# Altium footprint library MY_LIB_Connectors.PcbLib: 358 footprints (part 17 of 23)
Each footprint in its own frame and in the unit in brackets; x right, y up, seen from the top. Pads: shape width x height; smd on the part's side, far side on the other; paste and mask are expansions set on the pad; w line width, h text height; cw(c..) or ccw(c..) is an arc to the next point about the centre after c.
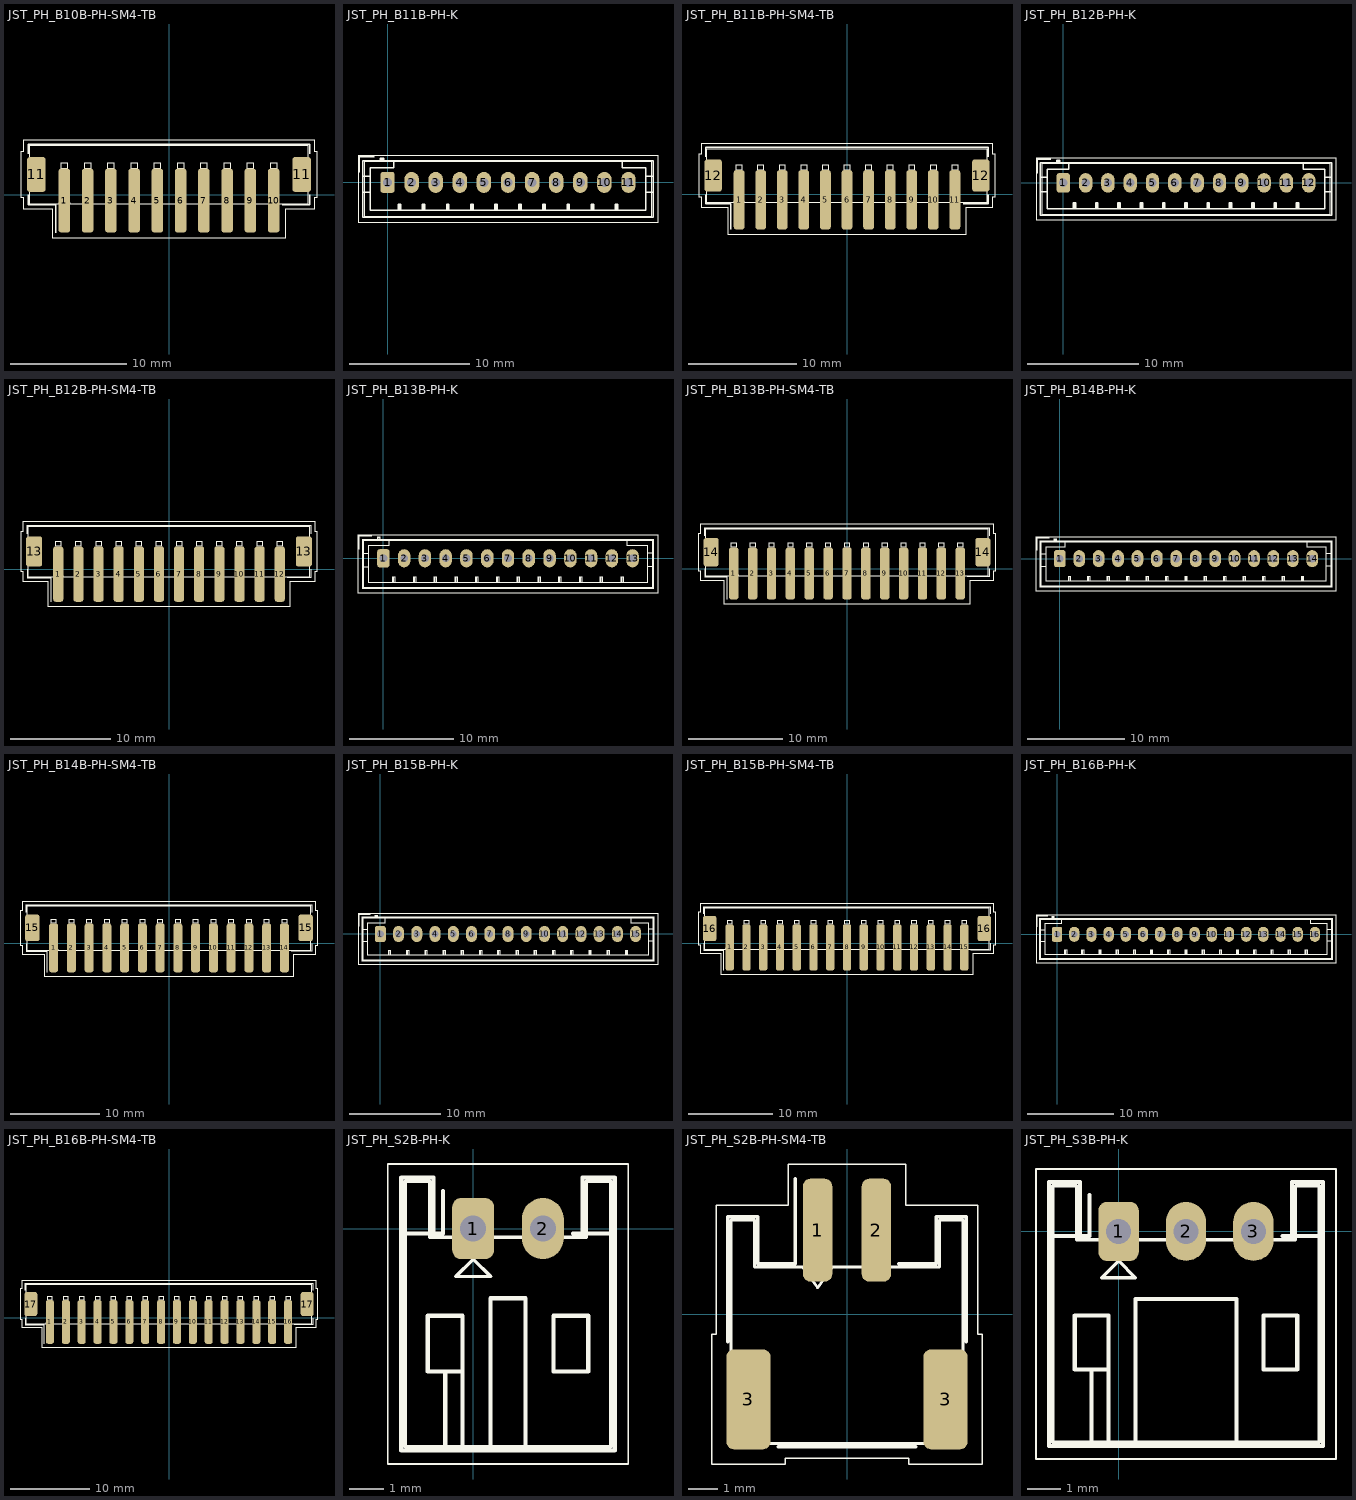
[diagram p16: the footprints below, top view; thin cyan lines are the x and y axes]

## JST_PH_B10B-PH-SM4-TB [mm] "JST B10B-PH-SM4-TB; reviewed KiCad footprint; ready STEP reference model"
height 6.725
pads (12):
  rrect50% 1x5.5 all layers, no hole: 1(-9,-0.5) 2(-7,-0.5) 3(-5,-0.5) 4(-3,-0.5) 5(-1,-0.5) 6(1,-0.5) 7(3,-0.5) 8(5,-0.5) 9(7,-0.5) 10(9,-0.5)
  rrect31% 1.6x3 all layers, no hole: 11(-11.4,1.75) 11(11.4,1.75)
Top Overlay:
  lines w0.05: -12.7,-0.25 -12.7,3.75 -12.48,3.75 -12.48,4.75 12.48,4.75 12.48,3.75 12.7,3.75 12.7,-0.25 12.48,-0.25 12.48,-1.25 10,-1.25 10,-3.75 -10,-3.75 -10,-1.25 -12.48,-1.25 -12.48,-0.25 -12.7,-0.25
  lines w0.1: -9.5,-0.75 -9,-0.043 -8.5,-0.75 ; -11.975,-0.75 -11.975,4.25 11.975,4.25 11.975,-0.75 -11.975,-0.75 ; -9.25,2.25 -8.75,2.25 -8.75,2.75 -9.25,2.75 -9.25,2.25 ; -7.25,2.25 -6.75,2.25 -6.75,2.75 -7.25,2.75 -7.25,2.25 ; -5.25,2.25 -4.75,2.25 -4.75,2.75 -5.25,2.75 -5.25,2.25 ; -3.25,2.25 -2.75,2.25 -2.75,2.75 -3.25,2.75 -3.25,2.25 ; -1.25,2.25 -0.75,2.25 -0.75,2.75 -1.25,2.75 -1.25,2.25 ; 0.75,2.25 1.25,2.25 1.25,2.75 0.75,2.75 0.75,2.25 ; 2.75,2.25 3.25,2.25 3.25,2.75 2.75,2.75 2.75,2.25 ; 4.75,2.25 5.25,2.25 5.25,2.75 4.75,2.75 4.75,2.25 ; 6.75,2.25 7.25,2.25 7.25,2.75 6.75,2.75 6.75,2.25 ; 8.75,2.25 9.25,2.25 9.25,2.75 8.75,2.75 8.75,2.25
  lines w0.12: -12.085,-0.01 -12.085,-0.86 -9.76,-0.86 -9.76,-3.25 ; -12.085,3.51 -12.085,4.36 12.085,4.36 12.085,3.51 ; 9.76,-0.86 12.085,-0.86 12.085,-0.01
3D body "JST-B10B-PH-SM4-TB.STEP": height 6.73, standoff 0, extent -11.975,-0.75 11.975,4.25

## JST_PH_B11B-PH-K [mm] "JST B11B-PH-K; reviewed KiCad footprint; ready STEP reference model"
height 6
pads (11):
  rrect42% 1.2x1.75 hole 0.75: 1(0,0)
  oval 1.2x1.75 hole 0.75: 2(2,0) 3(4,0) 4(6,0) 5(8,0) 6(10,0) 7(12,0) 8(14,0) 9(16,0) 10(18,0) 11(20,0)
Top Overlay:
  lines w0.05: -2.45,-3.3 -2.45,2.2 22.45,2.2 22.45,-3.3 -2.45,-3.3
  lines w0.1: -2.36,0.86 -2.36,2.11 -1.11,2.11 ; -1.95,-2.8 -1.95,1.7 21.95,1.7 21.95,-2.8 -1.95,-2.8
  lines w0.12: -2.36,0.86 -2.36,2.11 -1.11,2.11 ; -2.06,-0.8 -1.45,-0.8 ; -2.06,0.5 -1.45,0.5 ; -0.6,1.81 -0.6,2.01 -0.3,2.01 -0.3,1.81 ; -0.6,1.91 -0.3,1.91 ; 0.5,1.81 0.5,1.2 -1.45,1.2 -1.45,-2.3 21.45,-2.3 21.45,1.2 19.5,1.2 19.5,1.81 ; 0.9,-2.3 0.9,-1.8 1.1,-1.8 1.1,-2.3 ; 1,-2.3 1,-1.8 ; 2.9,-2.3 2.9,-1.8 3.1,-1.8 3.1,-2.3 ; 3,-2.3 3,-1.8 ; 4.9,-2.3 4.9,-1.8 5.1,-1.8 5.1,-2.3 ; 5,-2.3 5,-1.8 ; 6.9,-2.3 6.9,-1.8 7.1,-1.8 7.1,-2.3 ; 7,-2.3 7,-1.8 ; 8.9,-2.3 8.9,-1.8 9.1,-1.8 9.1,-2.3 ; 9,-2.3 9,-1.8 ; 10.9,-2.3 10.9,-1.8 11.1,-1.8 11.1,-2.3 ; 11,-2.3 11,-1.8 ; 12.9,-2.3 12.9,-1.8 13.1,-1.8 13.1,-2.3 ; 13,-2.3 13,-1.8 ; 14.9,-2.3 14.9,-1.8 15.1,-1.8 15.1,-2.3 ; 15,-2.3 15,-1.8 ; 16.9,-2.3 16.9,-1.8 17.1,-1.8 17.1,-2.3 ; 17,-2.3 17,-1.8 ; 18.9,-2.3 18.9,-1.8 19.1,-1.8 19.1,-2.3 ; 19,-2.3 19,-1.8 ; 21.45,-0.8 22.06,-0.8 ; 21.45,0.5 22.06,0.5 ; -2.06,-2.91 -2.06,1.81 22.06,1.81 22.06,-2.91 -2.06,-2.91
3D body "JST_PH_B11B-PH-K_1x11_P2.00mm_Vertical.step": height 6, standoff -3.4, extent -2.36,-2.8 21.95,2.11

## JST_PH_B11B-PH-SM4-TB [mm] "JST B11B-PH-SM4-TB; reviewed KiCad footprint; ready STEP reference model"
height 6.725
pads (13):
  rrect50% 1x5.5 all layers, no hole: 1(-10,-0.5) 2(-8,-0.5) 3(-6,-0.5) 4(-4,-0.5) 5(-2,-0.5) 6(0,-0.5) 7(2,-0.5) 8(4,-0.5) 9(6,-0.5) 10(8,-0.5) 11(10,-0.5)
  rrect31% 1.6x3 all layers, no hole: 12(-12.4,1.75) 12(12.4,1.75)
Top Overlay:
  lines w0.05: -13.7,-0.25 -13.7,3.75 -13.48,3.75 -13.48,4.75 13.48,4.75 13.48,3.75 13.7,3.75 13.7,-0.25 13.48,-0.25 13.48,-1.25 11,-1.25 11,-3.75 -11,-3.75 -11,-1.25 -13.48,-1.25 -13.48,-0.25 -13.7,-0.25
  lines w0.1: -10.5,-0.75 -10,-0.043 -9.5,-0.75 ; -12.975,-0.75 -12.975,4.25 12.975,4.25 12.975,-0.75 -12.975,-0.75 ; -10.25,2.25 -9.75,2.25 -9.75,2.75 -10.25,2.75 -10.25,2.25 ; -8.25,2.25 -7.75,2.25 -7.75,2.75 -8.25,2.75 -8.25,2.25 ; -6.25,2.25 -5.75,2.25 -5.75,2.75 -6.25,2.75 -6.25,2.25 ; -4.25,2.25 -3.75,2.25 -3.75,2.75 -4.25,2.75 -4.25,2.25 ; -2.25,2.25 -1.75,2.25 -1.75,2.75 -2.25,2.75 -2.25,2.25 ; -0.25,2.25 0.25,2.25 0.25,2.75 -0.25,2.75 -0.25,2.25 ; 1.75,2.25 2.25,2.25 2.25,2.75 1.75,2.75 1.75,2.25 ; 3.75,2.25 4.25,2.25 4.25,2.75 3.75,2.75 3.75,2.25 ; 5.75,2.25 6.25,2.25 6.25,2.75 5.75,2.75 5.75,2.25 ; 7.75,2.25 8.25,2.25 8.25,2.75 7.75,2.75 7.75,2.25 ; 9.75,2.25 10.25,2.25 10.25,2.75 9.75,2.75 9.75,2.25
  lines w0.12: -13.085,-0.01 -13.085,-0.86 -10.76,-0.86 -10.76,-3.25 ; -13.085,3.51 -13.085,4.36 13.085,4.36 13.085,3.51 ; 10.76,-0.86 13.085,-0.86 13.085,-0.01
3D body "JST-B11B-PH-SM4-TB.STEP": height 6.73, standoff 0, extent -12.975,-0.75 12.975,4.25

## JST_PH_B12B-PH-K [mm] "JST B12B-PH-K; reviewed KiCad footprint; ready STEP reference model"
height 6
pads (12):
  rrect42% 1.2x1.75 hole 0.75: 1(0,0)
  oval 1.2x1.75 hole 0.75: 2(2,0) 3(4,0) 4(6,0) 5(8,0) 6(10,0) 7(12,0) 8(14,0) 9(16,0) 10(18,0) 11(20,0) 12(22,0)
Top Overlay:
  lines w0.05: -2.45,-3.3 -2.45,2.2 24.45,2.2 24.45,-3.3 -2.45,-3.3
  lines w0.1: -2.36,0.86 -2.36,2.11 -1.11,2.11 ; -1.95,-2.8 -1.95,1.7 23.95,1.7 23.95,-2.8 -1.95,-2.8
  lines w0.12: -2.36,0.86 -2.36,2.11 -1.11,2.11 ; -2.06,-0.8 -1.45,-0.8 ; -2.06,0.5 -1.45,0.5 ; -0.6,1.81 -0.6,2.01 -0.3,2.01 -0.3,1.81 ; -0.6,1.91 -0.3,1.91 ; 0.5,1.81 0.5,1.2 -1.45,1.2 -1.45,-2.3 23.45,-2.3 23.45,1.2 21.5,1.2 21.5,1.81 ; 0.9,-2.3 0.9,-1.8 1.1,-1.8 1.1,-2.3 ; 1,-2.3 1,-1.8 ; 2.9,-2.3 2.9,-1.8 3.1,-1.8 3.1,-2.3 ; 3,-2.3 3,-1.8 ; 4.9,-2.3 4.9,-1.8 5.1,-1.8 5.1,-2.3 ; 5,-2.3 5,-1.8 ; 6.9,-2.3 6.9,-1.8 7.1,-1.8 7.1,-2.3 ; 7,-2.3 7,-1.8 ; 8.9,-2.3 8.9,-1.8 9.1,-1.8 9.1,-2.3 ; 9,-2.3 9,-1.8 ; 10.9,-2.3 10.9,-1.8 11.1,-1.8 11.1,-2.3 ; 11,-2.3 11,-1.8 ; 12.9,-2.3 12.9,-1.8 13.1,-1.8 13.1,-2.3 ; 13,-2.3 13,-1.8 ; 14.9,-2.3 14.9,-1.8 15.1,-1.8 15.1,-2.3 ; 15,-2.3 15,-1.8 ; 16.9,-2.3 16.9,-1.8 17.1,-1.8 17.1,-2.3 ; 17,-2.3 17,-1.8 ; 18.9,-2.3 18.9,-1.8 19.1,-1.8 19.1,-2.3 ; 19,-2.3 19,-1.8 ; 20.9,-2.3 20.9,-1.8 21.1,-1.8 21.1,-2.3 ; 21,-2.3 21,-1.8 ; 23.45,-0.8 24.06,-0.8 ; 23.45,0.5 24.06,0.5 ; -2.06,-2.91 -2.06,1.81 24.06,1.81 24.06,-2.91 -2.06,-2.91
3D body "JST_PH_B12B-PH-K_1x12_P2.00mm_Vertical.step": height 6, standoff -3.4, extent -2.36,-2.8 23.95,2.11

## JST_PH_B12B-PH-SM4-TB [mm] "JST B12B-PH-SM4-TB; reviewed KiCad footprint; ready STEP reference model"
height 6.725
pads (14):
  rrect50% 1x5.5 all layers, no hole: 1(-11,-0.5) 2(-9,-0.5) 3(-7,-0.5) 4(-5,-0.5) 5(-3,-0.5) 6(-1,-0.5) 7(1,-0.5) 8(3,-0.5) 9(5,-0.5) 10(7,-0.5) 11(9,-0.5) 12(11,-0.5)
  rrect31% 1.6x3 all layers, no hole: 13(-13.4,1.75) 13(13.4,1.75)
Top Overlay:
  lines w0.05: -14.7,-0.25 -14.7,3.75 -14.48,3.75 -14.48,4.75 14.48,4.75 14.48,3.75 14.7,3.75 14.7,-0.25 14.48,-0.25 14.48,-1.25 12,-1.25 12,-3.75 -12,-3.75 -12,-1.25 -14.48,-1.25 -14.48,-0.25 -14.7,-0.25
  lines w0.1: -11.5,-0.75 -11,-0.043 -10.5,-0.75 ; -13.975,-0.75 -13.975,4.25 13.975,4.25 13.975,-0.75 -13.975,-0.75 ; -11.25,2.25 -10.75,2.25 -10.75,2.75 -11.25,2.75 -11.25,2.25 ; -9.25,2.25 -8.75,2.25 -8.75,2.75 -9.25,2.75 -9.25,2.25 ; -7.25,2.25 -6.75,2.25 -6.75,2.75 -7.25,2.75 -7.25,2.25 ; -5.25,2.25 -4.75,2.25 -4.75,2.75 -5.25,2.75 -5.25,2.25 ; -3.25,2.25 -2.75,2.25 -2.75,2.75 -3.25,2.75 -3.25,2.25 ; -1.25,2.25 -0.75,2.25 -0.75,2.75 -1.25,2.75 -1.25,2.25 ; 0.75,2.25 1.25,2.25 1.25,2.75 0.75,2.75 0.75,2.25 ; 2.75,2.25 3.25,2.25 3.25,2.75 2.75,2.75 2.75,2.25 ; 4.75,2.25 5.25,2.25 5.25,2.75 4.75,2.75 4.75,2.25 ; 6.75,2.25 7.25,2.25 7.25,2.75 6.75,2.75 6.75,2.25 ; 8.75,2.25 9.25,2.25 9.25,2.75 8.75,2.75 8.75,2.25 ; 10.75,2.25 11.25,2.25 11.25,2.75 10.75,2.75 10.75,2.25
  lines w0.12: -14.085,-0.01 -14.085,-0.86 -11.76,-0.86 -11.76,-3.25 ; -14.085,3.51 -14.085,4.36 14.085,4.36 14.085,3.51 ; 11.76,-0.86 14.085,-0.86 14.085,-0.01
3D body "JST-B12B-PH-SM4-TB.STEP": height 6.73, standoff 0, extent -13.975,-0.75 13.975,4.25

## JST_PH_B13B-PH-K [mm] "JST B13B-PH-K; reviewed KiCad footprint; ready STEP reference model"
height 6
pads (13):
  rrect42% 1.2x1.75 hole 0.75: 1(0,0)
  oval 1.2x1.75 hole 0.75: 2(2,0) 3(4,0) 4(6,0) 5(8,0) 6(10,0) 7(12,0) 8(14,0) 9(16,0) 10(18,0) 11(20,0) 12(22,0) 13(24,0)
Top Overlay:
  lines w0.05: -2.45,-3.3 -2.45,2.2 26.45,2.2 26.45,-3.3 -2.45,-3.3
  lines w0.1: -2.36,0.86 -2.36,2.11 -1.11,2.11 ; -1.95,-2.8 -1.95,1.7 25.95,1.7 25.95,-2.8 -1.95,-2.8
  lines w0.12: -2.36,0.86 -2.36,2.11 -1.11,2.11 ; -2.06,-0.8 -1.45,-0.8 ; -2.06,0.5 -1.45,0.5 ; -0.6,1.81 -0.6,2.01 -0.3,2.01 -0.3,1.81 ; -0.6,1.91 -0.3,1.91 ; 0.5,1.81 0.5,1.2 -1.45,1.2 -1.45,-2.3 25.45,-2.3 25.45,1.2 23.5,1.2 23.5,1.81 ; 0.9,-2.3 0.9,-1.8 1.1,-1.8 1.1,-2.3 ; 1,-2.3 1,-1.8 ; 2.9,-2.3 2.9,-1.8 3.1,-1.8 3.1,-2.3 ; 3,-2.3 3,-1.8 ; 4.9,-2.3 4.9,-1.8 5.1,-1.8 5.1,-2.3 ; 5,-2.3 5,-1.8 ; 6.9,-2.3 6.9,-1.8 7.1,-1.8 7.1,-2.3 ; 7,-2.3 7,-1.8 ; 8.9,-2.3 8.9,-1.8 9.1,-1.8 9.1,-2.3 ; 9,-2.3 9,-1.8 ; 10.9,-2.3 10.9,-1.8 11.1,-1.8 11.1,-2.3 ; 11,-2.3 11,-1.8 ; 12.9,-2.3 12.9,-1.8 13.1,-1.8 13.1,-2.3 ; 13,-2.3 13,-1.8 ; 14.9,-2.3 14.9,-1.8 15.1,-1.8 15.1,-2.3 ; 15,-2.3 15,-1.8 ; 16.9,-2.3 16.9,-1.8 17.1,-1.8 17.1,-2.3 ; 17,-2.3 17,-1.8 ; 18.9,-2.3 18.9,-1.8 19.1,-1.8 19.1,-2.3 ; 19,-2.3 19,-1.8 ; 20.9,-2.3 20.9,-1.8 21.1,-1.8 21.1,-2.3 ; 21,-2.3 21,-1.8 ; 22.9,-2.3 22.9,-1.8 23.1,-1.8 23.1,-2.3 ; 23,-2.3 23,-1.8 ; 25.45,-0.8 26.06,-0.8 ; 25.45,0.5 26.06,0.5 ; -2.06,-2.91 -2.06,1.81 26.06,1.81 26.06,-2.91 -2.06,-2.91
3D body "JST_PH_B13B-PH-K_1x13_P2.00mm_Vertical.step": height 6, standoff -3.4, extent -2.36,-2.8 25.95,2.11

## JST_PH_B13B-PH-SM4-TB [mm] "JST B13B-PH-SM4-TB; reviewed KiCad footprint; ready STEP reference model"
height 6.725
pads (15):
  rrect50% 1x5.5 all layers, no hole: 1(-12,-0.5) 2(-10,-0.5) 3(-8,-0.5) 4(-6,-0.5) 5(-4,-0.5) 6(-2,-0.5) 7(0,-0.5) 8(2,-0.5) 9(4,-0.5) 10(6,-0.5) 11(8,-0.5) 12(10,-0.5) 13(12,-0.5)
  rrect31% 1.6x3 all layers, no hole: 14(-14.4,1.75) 14(14.4,1.75)
Top Overlay:
  lines w0.05: -15.7,-0.25 -15.7,3.75 -15.48,3.75 -15.48,4.75 15.48,4.75 15.48,3.75 15.7,3.75 15.7,-0.25 15.48,-0.25 15.48,-1.25 13,-1.25 13,-3.75 -13,-3.75 -13,-1.25 -15.48,-1.25 -15.48,-0.25 -15.7,-0.25
  lines w0.1: -12.5,-0.75 -12,-0.043 -11.5,-0.75 ; -14.975,-0.75 -14.975,4.25 14.975,4.25 14.975,-0.75 -14.975,-0.75 ; -12.25,2.25 -11.75,2.25 -11.75,2.75 -12.25,2.75 -12.25,2.25 ; -10.25,2.25 -9.75,2.25 -9.75,2.75 -10.25,2.75 -10.25,2.25 ; -8.25,2.25 -7.75,2.25 -7.75,2.75 -8.25,2.75 -8.25,2.25 ; -6.25,2.25 -5.75,2.25 -5.75,2.75 -6.25,2.75 -6.25,2.25 ; -4.25,2.25 -3.75,2.25 -3.75,2.75 -4.25,2.75 -4.25,2.25 ; -2.25,2.25 -1.75,2.25 -1.75,2.75 -2.25,2.75 -2.25,2.25 ; -0.25,2.25 0.25,2.25 0.25,2.75 -0.25,2.75 -0.25,2.25 ; 1.75,2.25 2.25,2.25 2.25,2.75 1.75,2.75 1.75,2.25 ; 3.75,2.25 4.25,2.25 4.25,2.75 3.75,2.75 3.75,2.25 ; 5.75,2.25 6.25,2.25 6.25,2.75 5.75,2.75 5.75,2.25 ; 7.75,2.25 8.25,2.25 8.25,2.75 7.75,2.75 7.75,2.25 ; 9.75,2.25 10.25,2.25 10.25,2.75 9.75,2.75 9.75,2.25 ; 11.75,2.25 12.25,2.25 12.25,2.75 11.75,2.75 11.75,2.25
  lines w0.12: -15.085,-0.01 -15.085,-0.86 -12.76,-0.86 -12.76,-3.25 ; -15.085,3.51 -15.085,4.36 15.085,4.36 15.085,3.51 ; 12.76,-0.86 15.085,-0.86 15.085,-0.01
3D body "JST-B13B-PH-SM4-TB.STEP": height 6.73, standoff 0, extent -14.975,-0.75 14.975,4.25

## JST_PH_B14B-PH-K [mm] "JST B14B-PH-K; reviewed KiCad footprint; ready STEP reference model"
height 6
pads (14):
  rrect42% 1.2x1.75 hole 0.75: 1(0,0)
  oval 1.2x1.75 hole 0.75: 2(2,0) 3(4,0) 4(6,0) 5(8,0) 6(10,0) 7(12,0) 8(14,0) 9(16,0) 10(18,0) 11(20,0) 12(22,0) 13(24,0) 14(26,0)
Top Overlay:
  lines w0.05: -2.45,-3.3 -2.45,2.2 28.45,2.2 28.45,-3.3 -2.45,-3.3
  lines w0.1: -2.36,0.86 -2.36,2.11 -1.11,2.11 ; -1.95,-2.8 -1.95,1.7 27.95,1.7 27.95,-2.8 -1.95,-2.8
  lines w0.12: -2.36,0.86 -2.36,2.11 -1.11,2.11 ; -2.06,-0.8 -1.45,-0.8 ; -2.06,0.5 -1.45,0.5 ; -0.6,1.81 -0.6,2.01 -0.3,2.01 -0.3,1.81 ; -0.6,1.91 -0.3,1.91 ; 0.5,1.81 0.5,1.2 -1.45,1.2 -1.45,-2.3 27.45,-2.3 27.45,1.2 25.5,1.2 25.5,1.81 ; 0.9,-2.3 0.9,-1.8 1.1,-1.8 1.1,-2.3 ; 1,-2.3 1,-1.8 ; 2.9,-2.3 2.9,-1.8 3.1,-1.8 3.1,-2.3 ; 3,-2.3 3,-1.8 ; 4.9,-2.3 4.9,-1.8 5.1,-1.8 5.1,-2.3 ; 5,-2.3 5,-1.8 ; 6.9,-2.3 6.9,-1.8 7.1,-1.8 7.1,-2.3 ; 7,-2.3 7,-1.8 ; 8.9,-2.3 8.9,-1.8 9.1,-1.8 9.1,-2.3 ; 9,-2.3 9,-1.8 ; 10.9,-2.3 10.9,-1.8 11.1,-1.8 11.1,-2.3 ; 11,-2.3 11,-1.8 ; 12.9,-2.3 12.9,-1.8 13.1,-1.8 13.1,-2.3 ; 13,-2.3 13,-1.8 ; 14.9,-2.3 14.9,-1.8 15.1,-1.8 15.1,-2.3 ; 15,-2.3 15,-1.8 ; 16.9,-2.3 16.9,-1.8 17.1,-1.8 17.1,-2.3 ; 17,-2.3 17,-1.8 ; 18.9,-2.3 18.9,-1.8 19.1,-1.8 19.1,-2.3 ; 19,-2.3 19,-1.8 ; 20.9,-2.3 20.9,-1.8 21.1,-1.8 21.1,-2.3 ; 21,-2.3 21,-1.8 ; 22.9,-2.3 22.9,-1.8 23.1,-1.8 23.1,-2.3 ; 23,-2.3 23,-1.8 ; 24.9,-2.3 24.9,-1.8 25.1,-1.8 25.1,-2.3 ; 25,-2.3 25,-1.8 ; 27.45,-0.8 28.06,-0.8 ; 27.45,0.5 28.06,0.5 ; -2.06,-2.91 -2.06,1.81 28.06,1.81 28.06,-2.91 -2.06,-2.91
3D body "JST_PH_B14B-PH-K_1x14_P2.00mm_Vertical.step": height 6, standoff -3.4, extent -2.36,-2.8 27.95,2.11

## JST_PH_B14B-PH-SM4-TB [mm] "JST B14B-PH-SM4-TB; reviewed KiCad footprint; ready STEP reference model"
height 6.725
pads (16):
  rrect50% 1x5.5 all layers, no hole: 1(-13,-0.5) 2(-11,-0.5) 3(-9,-0.5) 4(-7,-0.5) 5(-5,-0.5) 6(-3,-0.5) 7(-1,-0.5) 8(1,-0.5) 9(3,-0.5) 10(5,-0.5) 11(7,-0.5) 12(9,-0.5) 13(11,-0.5) 14(13,-0.5)
  rrect31% 1.6x3 all layers, no hole: 15(-15.4,1.75) 15(15.4,1.75)
Top Overlay:
  lines w0.05: -16.7,-0.25 -16.7,3.75 -16.48,3.75 -16.48,4.75 16.48,4.75 16.48,3.75 16.7,3.75 16.7,-0.25 16.48,-0.25 16.48,-1.25 14,-1.25 14,-3.75 -14,-3.75 -14,-1.25 -16.48,-1.25 -16.48,-0.25 -16.7,-0.25
  lines w0.1: -13.5,-0.75 -13,-0.043 -12.5,-0.75 ; -15.975,-0.75 -15.975,4.25 15.975,4.25 15.975,-0.75 -15.975,-0.75 ; -13.25,2.25 -12.75,2.25 -12.75,2.75 -13.25,2.75 -13.25,2.25 ; -11.25,2.25 -10.75,2.25 -10.75,2.75 -11.25,2.75 -11.25,2.25 ; -9.25,2.25 -8.75,2.25 -8.75,2.75 -9.25,2.75 -9.25,2.25 ; -7.25,2.25 -6.75,2.25 -6.75,2.75 -7.25,2.75 -7.25,2.25 ; -5.25,2.25 -4.75,2.25 -4.75,2.75 -5.25,2.75 -5.25,2.25 ; -3.25,2.25 -2.75,2.25 -2.75,2.75 -3.25,2.75 -3.25,2.25 ; -1.25,2.25 -0.75,2.25 -0.75,2.75 -1.25,2.75 -1.25,2.25 ; 0.75,2.25 1.25,2.25 1.25,2.75 0.75,2.75 0.75,2.25 ; 2.75,2.25 3.25,2.25 3.25,2.75 2.75,2.75 2.75,2.25 ; 4.75,2.25 5.25,2.25 5.25,2.75 4.75,2.75 4.75,2.25 ; 6.75,2.25 7.25,2.25 7.25,2.75 6.75,2.75 6.75,2.25 ; 8.75,2.25 9.25,2.25 9.25,2.75 8.75,2.75 8.75,2.25 ; 10.75,2.25 11.25,2.25 11.25,2.75 10.75,2.75 10.75,2.25 ; 12.75,2.25 13.25,2.25 13.25,2.75 12.75,2.75 12.75,2.25
  lines w0.12: -16.085,-0.01 -16.085,-0.86 -13.76,-0.86 -13.76,-3.25 ; -16.085,3.51 -16.085,4.36 16.085,4.36 16.085,3.51 ; 13.76,-0.86 16.085,-0.86 16.085,-0.01
3D body "JST-B14B-PH-SM4-TB.STEP": height 6.73, standoff 0, extent -15.975,-0.75 15.975,4.25

## JST_PH_B15B-PH-K [mm] "JST B15B-PH-K; reviewed KiCad footprint; ready STEP reference model"
height 6
pads (15):
  rrect42% 1.2x1.75 hole 0.75: 1(0,0)
  oval 1.2x1.75 hole 0.75: 2(2,0) 3(4,0) 4(6,0) 5(8,0) 6(10,0) 7(12,0) 8(14,0) 9(16,0) 10(18,0) 11(20,0) 12(22,0) 13(24,0) 14(26,0) 15(28,0)
Top Overlay:
  lines w0.05: -2.45,-3.3 -2.45,2.2 30.45,2.2 30.45,-3.3 -2.45,-3.3
  lines w0.1: -2.36,0.86 -2.36,2.11 -1.11,2.11 ; -1.95,-2.8 -1.95,1.7 29.95,1.7 29.95,-2.8 -1.95,-2.8
  lines w0.12: -2.36,0.86 -2.36,2.11 -1.11,2.11 ; -2.06,-0.8 -1.45,-0.8 ; -2.06,0.5 -1.45,0.5 ; -0.6,1.81 -0.6,2.01 -0.3,2.01 -0.3,1.81 ; -0.6,1.91 -0.3,1.91 ; 0.5,1.81 0.5,1.2 -1.45,1.2 -1.45,-2.3 29.45,-2.3 29.45,1.2 27.5,1.2 27.5,1.81 ; 0.9,-2.3 0.9,-1.8 1.1,-1.8 1.1,-2.3 ; 1,-2.3 1,-1.8 ; 2.9,-2.3 2.9,-1.8 3.1,-1.8 3.1,-2.3 ; 3,-2.3 3,-1.8 ; 4.9,-2.3 4.9,-1.8 5.1,-1.8 5.1,-2.3 ; 5,-2.3 5,-1.8 ; 6.9,-2.3 6.9,-1.8 7.1,-1.8 7.1,-2.3 ; 7,-2.3 7,-1.8 ; 8.9,-2.3 8.9,-1.8 9.1,-1.8 9.1,-2.3 ; 9,-2.3 9,-1.8 ; 10.9,-2.3 10.9,-1.8 11.1,-1.8 11.1,-2.3 ; 11,-2.3 11,-1.8 ; 12.9,-2.3 12.9,-1.8 13.1,-1.8 13.1,-2.3 ; 13,-2.3 13,-1.8 ; 14.9,-2.3 14.9,-1.8 15.1,-1.8 15.1,-2.3 ; 15,-2.3 15,-1.8 ; 16.9,-2.3 16.9,-1.8 17.1,-1.8 17.1,-2.3 ; 17,-2.3 17,-1.8 ; 18.9,-2.3 18.9,-1.8 19.1,-1.8 19.1,-2.3 ; 19,-2.3 19,-1.8 ; 20.9,-2.3 20.9,-1.8 21.1,-1.8 21.1,-2.3 ; 21,-2.3 21,-1.8 ; 22.9,-2.3 22.9,-1.8 23.1,-1.8 23.1,-2.3 ; 23,-2.3 23,-1.8 ; 24.9,-2.3 24.9,-1.8 25.1,-1.8 25.1,-2.3 ; 25,-2.3 25,-1.8 ; 26.9,-2.3 26.9,-1.8 27.1,-1.8 27.1,-2.3 ; 27,-2.3 27,-1.8 ; 29.45,-0.8 30.06,-0.8 ; 29.45,0.5 30.06,0.5 ; -2.06,-2.91 -2.06,1.81 30.06,1.81 30.06,-2.91 -2.06,-2.91
3D body "JST_PH_B15B-PH-K_1x15_P2.00mm_Vertical.step": height 6, standoff -3.4, extent -2.36,-2.8 29.95,2.11

## JST_PH_B15B-PH-SM4-TB [mm] "JST B15B-PH-SM4-TB; reviewed KiCad footprint; ready STEP reference model"
height 6.725
pads (17):
  rrect50% 1x5.5 all layers, no hole: 1(-14,-0.5) 2(-12,-0.5) 3(-10,-0.5) 4(-8,-0.5) 5(-6,-0.5) 6(-4,-0.5) 7(-2,-0.5) 8(0,-0.5) 9(2,-0.5) 10(4,-0.5) 11(6,-0.5) 12(8,-0.5) 13(10,-0.5) 14(12,-0.5) 15(14,-0.5)
  rrect31% 1.6x3 all layers, no hole: 16(-16.4,1.75) 16(16.4,1.75)
Top Overlay:
  lines w0.05: -17.7,-0.25 -17.7,3.75 -17.48,3.75 -17.48,4.75 17.48,4.75 17.48,3.75 17.7,3.75 17.7,-0.25 17.48,-0.25 17.48,-1.25 15,-1.25 15,-3.75 -15,-3.75 -15,-1.25 -17.48,-1.25 -17.48,-0.25 -17.7,-0.25
  lines w0.1: -14.5,-0.75 -14,-0.043 -13.5,-0.75 ; -16.975,-0.75 -16.975,4.25 16.975,4.25 16.975,-0.75 -16.975,-0.75 ; -14.25,2.25 -13.75,2.25 -13.75,2.75 -14.25,2.75 -14.25,2.25 ; -12.25,2.25 -11.75,2.25 -11.75,2.75 -12.25,2.75 -12.25,2.25 ; -10.25,2.25 -9.75,2.25 -9.75,2.75 -10.25,2.75 -10.25,2.25 ; -8.25,2.25 -7.75,2.25 -7.75,2.75 -8.25,2.75 -8.25,2.25 ; -6.25,2.25 -5.75,2.25 -5.75,2.75 -6.25,2.75 -6.25,2.25 ; -4.25,2.25 -3.75,2.25 -3.75,2.75 -4.25,2.75 -4.25,2.25 ; -2.25,2.25 -1.75,2.25 -1.75,2.75 -2.25,2.75 -2.25,2.25 ; -0.25,2.25 0.25,2.25 0.25,2.75 -0.25,2.75 -0.25,2.25 ; 1.75,2.25 2.25,2.25 2.25,2.75 1.75,2.75 1.75,2.25 ; 3.75,2.25 4.25,2.25 4.25,2.75 3.75,2.75 3.75,2.25 ; 5.75,2.25 6.25,2.25 6.25,2.75 5.75,2.75 5.75,2.25 ; 7.75,2.25 8.25,2.25 8.25,2.75 7.75,2.75 7.75,2.25 ; 9.75,2.25 10.25,2.25 10.25,2.75 9.75,2.75 9.75,2.25 ; 11.75,2.25 12.25,2.25 12.25,2.75 11.75,2.75 11.75,2.25 ; 13.75,2.25 14.25,2.25 14.25,2.75 13.75,2.75 13.75,2.25
  lines w0.12: -17.085,-0.01 -17.085,-0.86 -14.76,-0.86 -14.76,-3.25 ; -17.085,3.51 -17.085,4.36 17.085,4.36 17.085,3.51 ; 14.76,-0.86 17.085,-0.86 17.085,-0.01
3D body "JST-B15B-PH-SM4-TB.STEP": height 6.73, standoff 0, extent -16.975,-0.75 16.975,4.25

## JST_PH_B16B-PH-K [mm] "JST B16B-PH-K; reviewed KiCad footprint; ready STEP reference model"
height 6
pads (16):
  rrect42% 1.2x1.75 hole 0.75: 1(0,0)
  oval 1.2x1.75 hole 0.75: 2(2,0) 3(4,0) 4(6,0) 5(8,0) 6(10,0) 7(12,0) 8(14,0) 9(16,0) 10(18,0) 11(20,0) 12(22,0) 13(24,0) 14(26,0) 15(28,0) 16(30,0)
Top Overlay:
  lines w0.05: -2.45,-3.3 -2.45,2.2 32.45,2.2 32.45,-3.3 -2.45,-3.3
  lines w0.1: -2.36,0.86 -2.36,2.11 -1.11,2.11 ; -1.95,-2.8 -1.95,1.7 31.95,1.7 31.95,-2.8 -1.95,-2.8
  lines w0.12: -2.36,0.86 -2.36,2.11 -1.11,2.11 ; -2.06,-0.8 -1.45,-0.8 ; -2.06,0.5 -1.45,0.5 ; -0.6,1.81 -0.6,2.01 -0.3,2.01 -0.3,1.81 ; -0.6,1.91 -0.3,1.91 ; 0.5,1.81 0.5,1.2 -1.45,1.2 -1.45,-2.3 31.45,-2.3 31.45,1.2 29.5,1.2 29.5,1.81 ; 0.9,-2.3 0.9,-1.8 1.1,-1.8 1.1,-2.3 ; 1,-2.3 1,-1.8 ; 2.9,-2.3 2.9,-1.8 3.1,-1.8 3.1,-2.3 ; 3,-2.3 3,-1.8 ; 4.9,-2.3 4.9,-1.8 5.1,-1.8 5.1,-2.3 ; 5,-2.3 5,-1.8 ; 6.9,-2.3 6.9,-1.8 7.1,-1.8 7.1,-2.3 ; 7,-2.3 7,-1.8 ; 8.9,-2.3 8.9,-1.8 9.1,-1.8 9.1,-2.3 ; 9,-2.3 9,-1.8 ; 10.9,-2.3 10.9,-1.8 11.1,-1.8 11.1,-2.3 ; 11,-2.3 11,-1.8 ; 12.9,-2.3 12.9,-1.8 13.1,-1.8 13.1,-2.3 ; 13,-2.3 13,-1.8 ; 14.9,-2.3 14.9,-1.8 15.1,-1.8 15.1,-2.3 ; 15,-2.3 15,-1.8 ; 16.9,-2.3 16.9,-1.8 17.1,-1.8 17.1,-2.3 ; 17,-2.3 17,-1.8 ; 18.9,-2.3 18.9,-1.8 19.1,-1.8 19.1,-2.3 ; 19,-2.3 19,-1.8 ; 20.9,-2.3 20.9,-1.8 21.1,-1.8 21.1,-2.3 ; 21,-2.3 21,-1.8 ; 22.9,-2.3 22.9,-1.8 23.1,-1.8 23.1,-2.3 ; 23,-2.3 23,-1.8 ; 24.9,-2.3 24.9,-1.8 25.1,-1.8 25.1,-2.3 ; 25,-2.3 25,-1.8 ; 26.9,-2.3 26.9,-1.8 27.1,-1.8 27.1,-2.3 ; 27,-2.3 27,-1.8 ; 28.9,-2.3 28.9,-1.8 29.1,-1.8 29.1,-2.3 ; 29,-2.3 29,-1.8 ; 31.45,-0.8 32.06,-0.8 ; 31.45,0.5 32.06,0.5 ; -2.06,-2.91 -2.06,1.81 32.06,1.81 32.06,-2.91 -2.06,-2.91
3D body "JST_PH_B16B-PH-K_1x16_P2.00mm_Vertical.step": height 6, standoff -3.4, extent -2.36,-2.8 31.95,2.11

## JST_PH_B16B-PH-SM4-TB [mm] "JST B16B-PH-SM4-TB; reviewed KiCad footprint; ready STEP reference model"
height 6.725
pads (18):
  rrect50% 1x5.5 all layers, no hole: 1(-15,-0.5) 2(-13,-0.5) 3(-11,-0.5) 4(-9,-0.5) 5(-7,-0.5) 6(-5,-0.5) 7(-3,-0.5) 8(-1,-0.5) 9(1,-0.5) 10(3,-0.5) 11(5,-0.5) 12(7,-0.5) 13(9,-0.5) 14(11,-0.5) 15(13,-0.5) 16(15,-0.5)
  rrect31% 1.6x3 all layers, no hole: 17(-17.4,1.75) 17(17.4,1.75)
Top Overlay:
  lines w0.05: -18.7,-0.25 -18.7,3.75 -18.48,3.75 -18.48,4.75 18.48,4.75 18.48,3.75 18.7,3.75 18.7,-0.25 18.48,-0.25 18.48,-1.25 16,-1.25 16,-3.75 -16,-3.75 -16,-1.25 -18.48,-1.25 -18.48,-0.25 -18.7,-0.25
  lines w0.1: -15.5,-0.75 -15,-0.043 -14.5,-0.75 ; -17.975,-0.75 -17.975,4.25 17.975,4.25 17.975,-0.75 -17.975,-0.75 ; -15.25,2.25 -14.75,2.25 -14.75,2.75 -15.25,2.75 -15.25,2.25 ; -13.25,2.25 -12.75,2.25 -12.75,2.75 -13.25,2.75 -13.25,2.25 ; -11.25,2.25 -10.75,2.25 -10.75,2.75 -11.25,2.75 -11.25,2.25 ; -9.25,2.25 -8.75,2.25 -8.75,2.75 -9.25,2.75 -9.25,2.25 ; -7.25,2.25 -6.75,2.25 -6.75,2.75 -7.25,2.75 -7.25,2.25 ; -5.25,2.25 -4.75,2.25 -4.75,2.75 -5.25,2.75 -5.25,2.25 ; -3.25,2.25 -2.75,2.25 -2.75,2.75 -3.25,2.75 -3.25,2.25 ; -1.25,2.25 -0.75,2.25 -0.75,2.75 -1.25,2.75 -1.25,2.25 ; 0.75,2.25 1.25,2.25 1.25,2.75 0.75,2.75 0.75,2.25 ; 2.75,2.25 3.25,2.25 3.25,2.75 2.75,2.75 2.75,2.25 ; 4.75,2.25 5.25,2.25 5.25,2.75 4.75,2.75 4.75,2.25 ; 6.75,2.25 7.25,2.25 7.25,2.75 6.75,2.75 6.75,2.25 ; 8.75,2.25 9.25,2.25 9.25,2.75 8.75,2.75 8.75,2.25 ; 10.75,2.25 11.25,2.25 11.25,2.75 10.75,2.75 10.75,2.25 ; 12.75,2.25 13.25,2.25 13.25,2.75 12.75,2.75 12.75,2.25 ; 14.75,2.25 15.25,2.25 15.25,2.75 14.75,2.75 14.75,2.25
  lines w0.12: -18.085,-0.01 -18.085,-0.86 -15.76,-0.86 -15.76,-3.25 ; -18.085,3.51 -18.085,4.36 18.085,4.36 18.085,3.51 ; 15.76,-0.86 18.085,-0.86 18.085,-0.01
3D body "JST-B16B-PH-SM4-TB.STEP": height 6.73, standoff 0, extent -17.975,-0.75 17.975,4.25

## JST_PH_S2B-PH-K [mm] "JST S2B-PH-K; reviewed KiCad footprint; ready STEP reference model"
height 4.85
pads (2):
  rrect42% 1.2x1.75 hole 0.75: 1(0,0)
  oval 1.2x1.75 hole 0.75: 2(2,0)
Top Overlay:
  lines w0.05: -2.45,-6.75 -2.45,1.85 4.45,1.85 4.45,-6.75 -2.45,-6.75
  lines w0.1: -1.95,-6.25 -1.95,1.35 -1.25,1.35 -1.25,-0.25 3.25,-0.25 3.25,1.35 3.95,1.35 3.95,-6.25 -1.95,-6.25 ; -0.5,-1.375 0.5,-1.375 0,-0.875 -0.5,-1.375
  lines w0.12: -2.06,-0.14 -1.14,-0.14 ; -0.86,1.075 -0.86,-0.14 -1.14,-0.14 ; -0.8,-6.36 -0.8,-4.1 ; -0.3,-6.36 -0.3,-4.1 ; 0.5,-6.36 0.5,-2 1.5,-2 1.5,-6.36 ; 2.86,-0.14 3.14,-0.14 ; 4.06,-0.14 3.14,-0.14 ; -1.14,-0.14 -1.14,1.46 -2.06,1.46 -2.06,-6.36 4.06,-6.36 4.06,1.46 3.14,1.46 3.14,-0.14 ; -0.3,-4.1 -1.3,-4.1 -1.3,-2.5 -0.3,-2.5 -0.3,-4.1 ; 2.3,-4.1 2.3,-2.5 3.3,-2.5 3.3,-4.1 2.3,-4.1
3D body "JST_PH_S2B-PH-K_1x02_P2.00mm_Horizontal.step": height 4.85, standoff -3.4, extent -1.95,-6.25 3.95,1.35

## JST_PH_S2B-PH-SM4-TB [mm] "JST S2B-PH-SM4-TB; reviewed KiCad footprint; ready STEP reference model"
height 5.588
pads (4):
  rrect50% 1x3.5 all layers, no hole: 1(-1,2.85) 2(1,2.85)
  rrect33% 1.5x3.4 all layers, no hole: 3(-3.35,-2.9) 3(3.35,-2.9)
Top Overlay:
  lines w0.05: -4.6,-5.1 -4.6,-0.69 -4.45,-0.69 -4.45,3.7 -2,3.7 -2,5.1 2,5.1 2,3.7 4.45,3.7 4.45,-0.69 4.6,-0.69 4.6,-5.1 2.1,-5.1 2.1,-4.9 -2.1,-4.9 -2.1,-5.1 -4.6,-5.1
  lines w0.1: -1.5,1.6 -1,0.893 -0.5,1.6 ; -3.95,-4.4 -3.95,3.2 -3.15,3.2 -3.15,1.6 3.15,1.6 3.15,3.2 3.95,3.2 3.95,-4.4 -3.95,-4.4
  lines w0.12: -4.06,-0.94 -4.06,3.31 -3.04,3.31 -3.04,1.71 -1.76,1.71 -1.76,4.6 ; -2.34,-4.51 2.34,-4.51 ; 1.76,1.71 3.04,1.71 3.04,3.31 4.06,3.31 4.06,-0.94
3D body "s2b-ph-sm4-tb.step": height 5.59, standoff 0, extent -3.95,-4.4 3.95,3.2

## JST_PH_S3B-PH-K [mm] "JST S3B-PH-K; reviewed KiCad footprint; ready STEP reference model"
height 4.85
pads (3):
  rrect42% 1.2x1.75 hole 0.75: 1(0,0)
  oval 1.2x1.75 hole 0.75: 2(2,0) 3(4,0)
Top Overlay:
  lines w0.05: -2.45,-6.75 -2.45,1.85 6.45,1.85 6.45,-6.75 -2.45,-6.75
  lines w0.1: -1.95,-6.25 -1.95,1.35 -1.25,1.35 -1.25,-0.25 5.25,-0.25 5.25,1.35 5.95,1.35 5.95,-6.25 -1.95,-6.25 ; -0.5,-1.375 0.5,-1.375 0,-0.875 -0.5,-1.375
  lines w0.12: -2.06,-0.14 -1.14,-0.14 ; -0.86,1.075 -0.86,-0.14 -1.14,-0.14 ; -0.8,-6.36 -0.8,-4.1 ; -0.3,-6.36 -0.3,-4.1 ; 0.5,-6.36 0.5,-2 3.5,-2 3.5,-6.36 ; 4.86,-0.14 5.14,-0.14 ; 6.06,-0.14 5.14,-0.14 ; -1.14,-0.14 -1.14,1.46 -2.06,1.46 -2.06,-6.36 6.06,-6.36 6.06,1.46 5.14,1.46 5.14,-0.14 ; -0.3,-4.1 -1.3,-4.1 -1.3,-2.5 -0.3,-2.5 -0.3,-4.1 ; 4.3,-4.1 4.3,-2.5 5.3,-2.5 5.3,-4.1 4.3,-4.1
3D body "JST_PH_S3B-PH-K_1x03_P2.00mm_Horizontal.step": height 4.85, standoff -3.4, extent -1.95,-6.25 5.95,1.35